# Altium footprint library MasterLib.PcbLib: 54 footprints (part 3 of 4)
Each footprint in its own frame and in the unit in brackets; x right, y up, seen from the top. Pads: shape width x height; smd on the part's side, far side on the other; paste and mask are expansions set on the pad; w line width, h text height; cw(c..) or ccw(c..) is an arc to the next point about the centre after c.
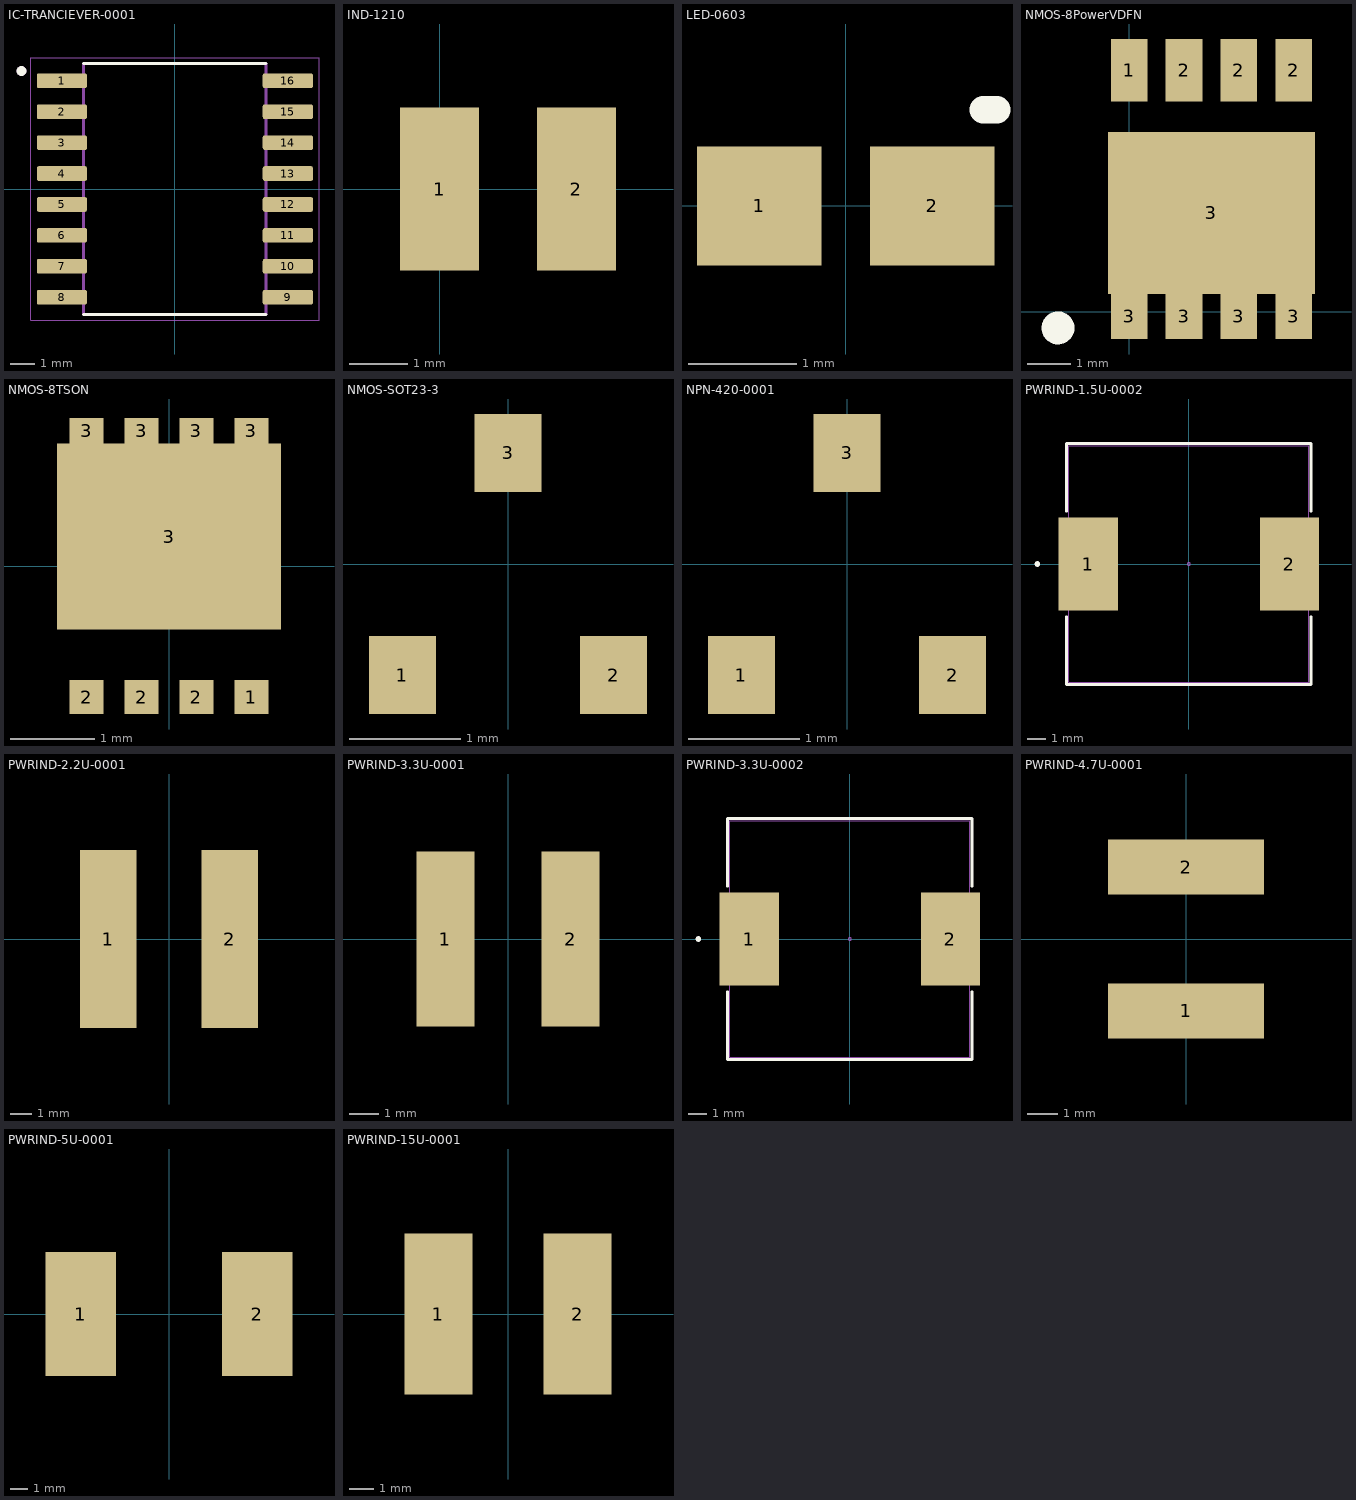
[diagram p2: the footprints below, top view; thin cyan lines are the x and y axes]

## IC-TRANCIEVER-0001 [mm]
pads (16):
  rrect25% 2.06x0.6 smd: 1(-4.64,4.445) 2(-4.64,3.175) 3(-4.64,1.905) 4(-4.64,0.635) 5(-4.64,-0.635) 6(-4.64,-1.905) 7(-4.64,-3.175) 8(-4.64,-4.445) 9(4.64,-4.445) 10(4.64,-3.175) 11(4.64,-1.905) 12(4.64,-0.635) 13(4.64,0.635) 14(4.64,1.905) 15(4.64,3.175) 16(4.64,4.445)
Top Overlay:
  circle w0.2: c-6.3,4.845 r0.1
  lines w0.127: -3.75,-5.15 3.75,-5.15 ; -3.75,5.15 3.75,5.15
Mechanical 13:
  circle w0.2: c-6.3,4.845 r0.1
  lines w0.127: -3.75,-5.15 3.75,-5.15 3.75,5.15 -3.75,5.15 -3.75,-5.15
Mechanical 15:
  lines w0.05: -5.92,-5.4 5.92,-5.4 5.92,5.4 -5.92,5.4 -5.92,-5.4
3D body "step_temp.STEP": height 2.65, standoff 0, extent -5.15,-5.15 5.15,5.15

## IND-1210 [mm]
pads (2):
  rect 1.35x2.8 smd: 1(0,0) 2(2.35,0)
3D body "User Library-3225.STEP": height 1.9, standoff 0, extent -0.425,-1.25 2.775,1.25

## LED-0603 [mm]
pads (2):
  rect 1.15x1.1 smd: 1(-0.8,0) 2(0.8,0)
Top Overlay:
  lines w0.254: 1.27,0.889 1.397,0.889
3D body "HSMW-C191.STEP": height 1, standoff 0, extent -0.8,-0.3 0.8,0.3

## LQFP-48 [mm]

## NMOS-8PowerVDFN [mm]
pads (9):
  rect 0.85x1.45 smd: 1(0,5.588) 2(1.27,5.588) 2(2.54,5.588) 2(3.81,5.588)
  rect 0.85x1.05 smd: 3(0,-0.112) 3(1.27,-0.112) 3(2.54,-0.112) 3(3.81,-0.112)
  rect 4.8x3.75 smd: 3(1.905,2.286)
Top Overlay:
  circle w0.254: c-1.651,-0.381 r0.254
  lines w0.254: -1.905,-0.381 -1.397,-0.381 -1.651,-0.381 ; -1.651,-0.635 -1.651,-0.381 ; -1.651,-0.127 -1.651,-0.381

## NMOS-8TSON [mm]
pads (9):
  rect 0.4x0.4 smd: 1(0.975,-1.55) 2(-0.975,-1.55) 2(-0.325,-1.55) 2(0.325,-1.55)
  rect 0.4x0.3 smd: 3(-0.975,1.6) 3(-0.325,1.6) 3(0.325,1.6) 3(0.975,1.6)
  rect 2.65x2.2 smd: 3(0,0.35)
3D body "TSON Advance.STEP": height 0.85, standoff 0, extent -1.65,-1.65 1.65,1.65

## NMOS-SOT23-3 [mm]
pads (3):
  rect 0.6x0.7 smd: 1(-0.95,-1) 2(0.95,-1) 3(0,1)
3D body "LM4040C20IDBZTG4.STEP": height 1.12, standoff 0, extent -1.46,-1.185 1.46,1.185

## NPN-420-0001 [mm]
pads (3):
  rect 0.6x0.7 smd: 1(-0.95,-1) 2(0.95,-1) 3(0,1)
3D body "SOT23_NXP.step": height 1.09, standoff 0, extent -1.499,-1.25 1.499,1.25

## PCBComponent_1 [mm]

## PWRIND-1.5U-0002 [mil]
pads (2):
  rect 126x199 smd paste+0 mask+0: 1(-214.59,0) 2(214.59,0)
Top Overlay:
  circle w6: c-323.09,0 r3
  lines w6: -261,-112.6 -261,-257 261,-257 261,-112.6 ; -261,112.6 -261,257 261,257 261,112.6
Mechanical 13:
  circle w0: c0,0 r3
  lines w1: -256,-252 256,-252 256,252 -256,252 -256,-252
3D body "SRP1265A-470M_BRN.step": height 256.1, standoff 0, extent -275.59,-252.01 275.59,252.01

## PWRIND-2.2U-0001 [mm]
pads (2):
  rect 2.6x8.2 smd: 1(-2.8,0) 2(2.8,0)
3D body "srn8040-2r2y.stp": height 4, standoff 0, extent -4,-4 4,4

## PWRIND-3.3U-0001 [mm]
pads (2):
  rect 2x6 smd: 1(-2.15,0) 2(2.15,0)
3D body "SRN6045-3R3Y--3DModel-STEP-269445.STEP": height 4.5, standoff 0, extent -3,-3 3,3

## PWRIND-3.3U-0002 [mil]
pads (2):
  rect 126x199 smd paste+0 mask+0: 1(-214.59,0) 2(214.59,0)
Top Overlay:
  circle w6: c-323.09,0 r3
  lines w6: -261,-112.6 -261,-257 261,-257 261,-112.6 ; -261,112.6 -261,257 261,257 261,112.6
Mechanical 13:
  circle w0: c0,0 r3
  lines w1: -256,-252 256,-252 256,252 -256,252 -256,-252
3D body "SRP1265A-470M_BRN.step": height 256.1, standoff 0, extent -275.59,-252.01 275.59,252.01

## PWRIND-4.7U-0001 [mm]
pads (2):
  rect 5.1x1.8 smd: 1(0,-2.35) 2(0,2.35)

## PWRIND-5U-0001 [mm]
pads (2):
  rect 4x7 smd: 1(-5,0) 2(5,0)
3D body "IND_BOURNS_SRR1240.step": height 4.5, standoff 0, extent -6.401,-6.403 6.401,6.403

## PWRIND-15U-0001 [mm]
pads (2):
  rect 2.8x6.6 smd: 1(-2.85,0) 2(2.85,0)
3D body "User Library-Bourns_SRN8040TA_series_H3_7mm.STEP": height 3.7, standoff 0.01, extent -4,-4 4,4